# Altium schematic symbol library Thunderscope_Rev5.3.SchLib: 94 symbols
Pins are listed as number, name and electrical type; pins without a type are passive.

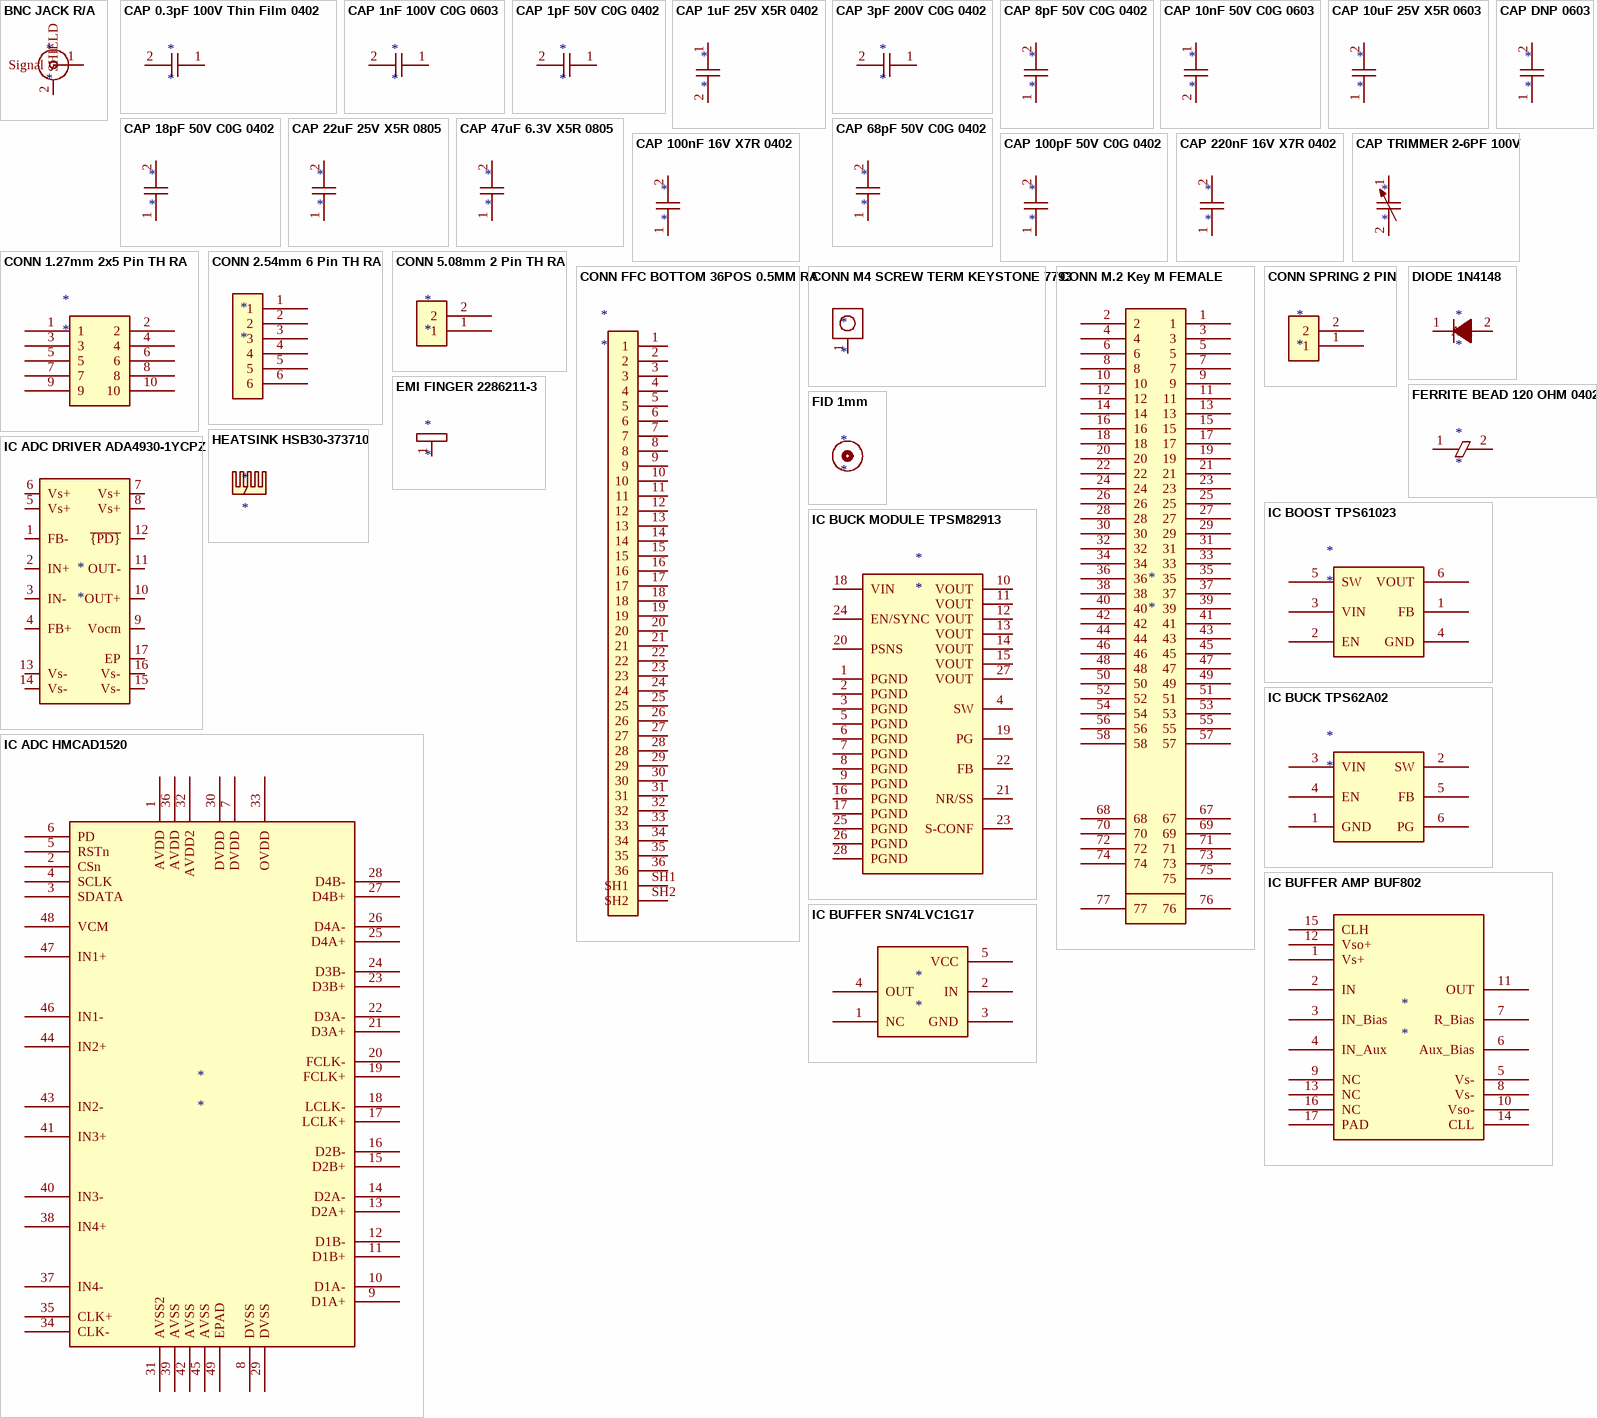
[diagram p0: symbols BNC JACK R/A to IC BUFFER SN74LVC1G17]

## BNC JACK R/A
designator *
pins: 1 Signal, 2 SHIELD

## CAP 0.3pF 100V Thin Film 0402
designator *
pins: 1, 2

## CAP 1nF 100V C0G 0603
designator *
pins: 1, 2

## CAP 1pF 50V C0G 0402
designator *
pins: 1, 2

## CAP 1uF 25V X5R 0402
designator *
pins: 1, 2

## CAP 3pF 200V C0G 0402
designator *
pins: 1, 2

## CAP 8pF 50V C0G 0402
designator *
pins: 1, 2

## CAP 10nF 50V C0G 0603
designator *
pins: 1, 2

## CAP 10uF 25V X5R 0603
designator *
pins: 1, 2

## CAP 18pF 50V C0G 0402
designator *
pins: 1, 2

## CAP 22uF 25V X5R 0805
designator *
pins: 1, 2

## CAP 47uF 6.3V X5R 0805
designator *
pins: 1, 2

## CAP 68pF 50V C0G 0402
designator *
pins: 1, 2

## CAP 100nF 16V X7R 0402
designator *
pins: 1, 2

## CAP 100pF 50V C0G 0402
designator *
pins: 1, 2

## CAP 220nF 16V X7R 0402
designator *
pins: 1, 2

## CAP DNP 0603
designator *
pins: 1, 2

## CAP TRIMMER 2-6PF 100V
designator *
pins: 1, 2

## CONN 1.27mm 2x5 Pin TH RA
designator *
pins: 1, 2, 3, 4, 5, 6, 7, 8, 9, 10

## CONN 2.54mm 6 Pin TH RA
designator *
pins: 1, 2, 3, 4, 5, 6

## CONN 5.08mm 2 Pin TH RA
designator *
pins: 1, 2

## CONN FFC BOTTOM 36POS 0.5MM RA
designator *
pins: 1, 2, 3, 4, 5, 6, 7, 8, 9, 10, 11, 12, 13, 14, 15, 16, 17, 18, 19, 20, 21, 22, 23, 24, 25, 26, 27, 28, 29, 30, 31, 32, 33, 34, 35, 36, SH1, SH2

## CONN M4 SCREW TERM KEYSTONE 7793
designator *
pins: 1

## CONN M.2 Key M FEMALE
designator *
pins: 1, 2, 3, 4, 5, 6, 7, 8, 9, 10, 11, 12, 13, 14, 15, 16, 17, 18, 19, 20, 21, 22, 23, 24, 25, 26, 27, 28, 29, 30, 31, 32, 33, 34, 35, 36, 37, 38, 39, 40, 41, 42, 43, 44, 45, 46, 47, 48, 49, 50, 51, 52, 53, 54, 55, 56, 57, 58, 67, 68, 69, 70, 71, 72, 73, 74, 75, 76, 77

## CONN SPRING 2 PIN
designator *
pins: 1, 2

## DIODE 1N4148
designator *
pins: 1 K, 2 A

## EMI FINGER 2286211-3
designator *
pins: 1

## FERRITE BEAD 120 OHM 0402
designator *
pins: 1, 2

## FID 1mm
designator *

## HEATSINK HSB30-373710
designator *

## IC ADC DRIVER ADA4930-1YCPZ
designator *
pins: 1 FB-, 2 IN+, 3 IN-, 4 FB+, 5 Vs+, 6 Vs+, 7 Vs+, 8 Vs+, 9 Vocm, 10 OUT+, 11 OUT-, 12 ~{{PD}}, 13 Vs-, 14 Vs-, 15 Vs-, 16 Vs-, 17 EP

## IC ADC HMCAD1520
designator *
pins: 1 AVDD, 2 CSn, 3 SDATA, 4 SCLK, 5 RSTn, 6 PD, 7 DVDD, 8 DVSS, 9 D1A+, 10 D1A-, 11 D1B+, 12 D1B-, 13 D2A+, 14 D2A-, 15 D2B+, 16 D2B-, 17 LCLK+, 18 LCLK-, 19 FCLK+, 20 FCLK-, 21 D3A+, 22 D3A-, 23 D3B+, 24 D3B-, 25 D4A+, 26 D4A-, 27 D4B+, 28 D4B-, 29 DVSS, 30 DVDD, 31 AVSS2, 32 AVDD2, 33 OVDD, 34 CLK-, 35 CLK+, 36 AVDD, 37 IN4-, 38 IN4+, 39 AVSS, 40 IN3-, 41 IN3+, 42 AVSS, 43 IN2-, 44 IN2+, 45 AVSS, 46 IN1-, 47 IN1+, 48 VCM, 49 EPAD

## IC BOOST TPS61023
designator *
pins: 1 FB, 2 EN, 3 VIN, 4 GND, 5 SW, 6 VOUT

## IC BUCK MODULE TPSM82913
designator *
pins: 1 PGND, 2 PGND, 3 PGND, 4 SW, 5 PGND, 6 PGND, 7 PGND, 8 PGND, 9 PGND, 10 VOUT, 11 VOUT, 12 VOUT, 13 VOUT, 14 VOUT, 15 VOUT, 16 PGND, 17 PGND, 18 VIN, 19 PG, 20 PSNS, 21 NR/SS, 22 FB, 23 S-CONF, 24 EN/SYNC, 25 PGND, 26 PGND, 27 VOUT, 28 PGND

## IC BUCK TPS62A02
designator *
pins: 1 GND, 2 SW, 3 VIN, 4 EN, 5 FB, 6 PG

## IC BUFFER AMP BUF802
designator *
pins: 1 Vs+, 2 IN, 3 IN_Bias, 4 IN_Aux, 5 Vs-, 6 Aux_Bias, 7 R_Bias, 8 Vs-, 9 NC, 10 Vso-, 11 OUT, 12 Vso+, 13 NC, 14 CLL, 15 CLH, 16 NC, 17 PAD

## IC BUFFER SN74LVC1G17
designator *
pins: 1 NC, 2 IN, 3 GND, 4 OUT, 5 VCC

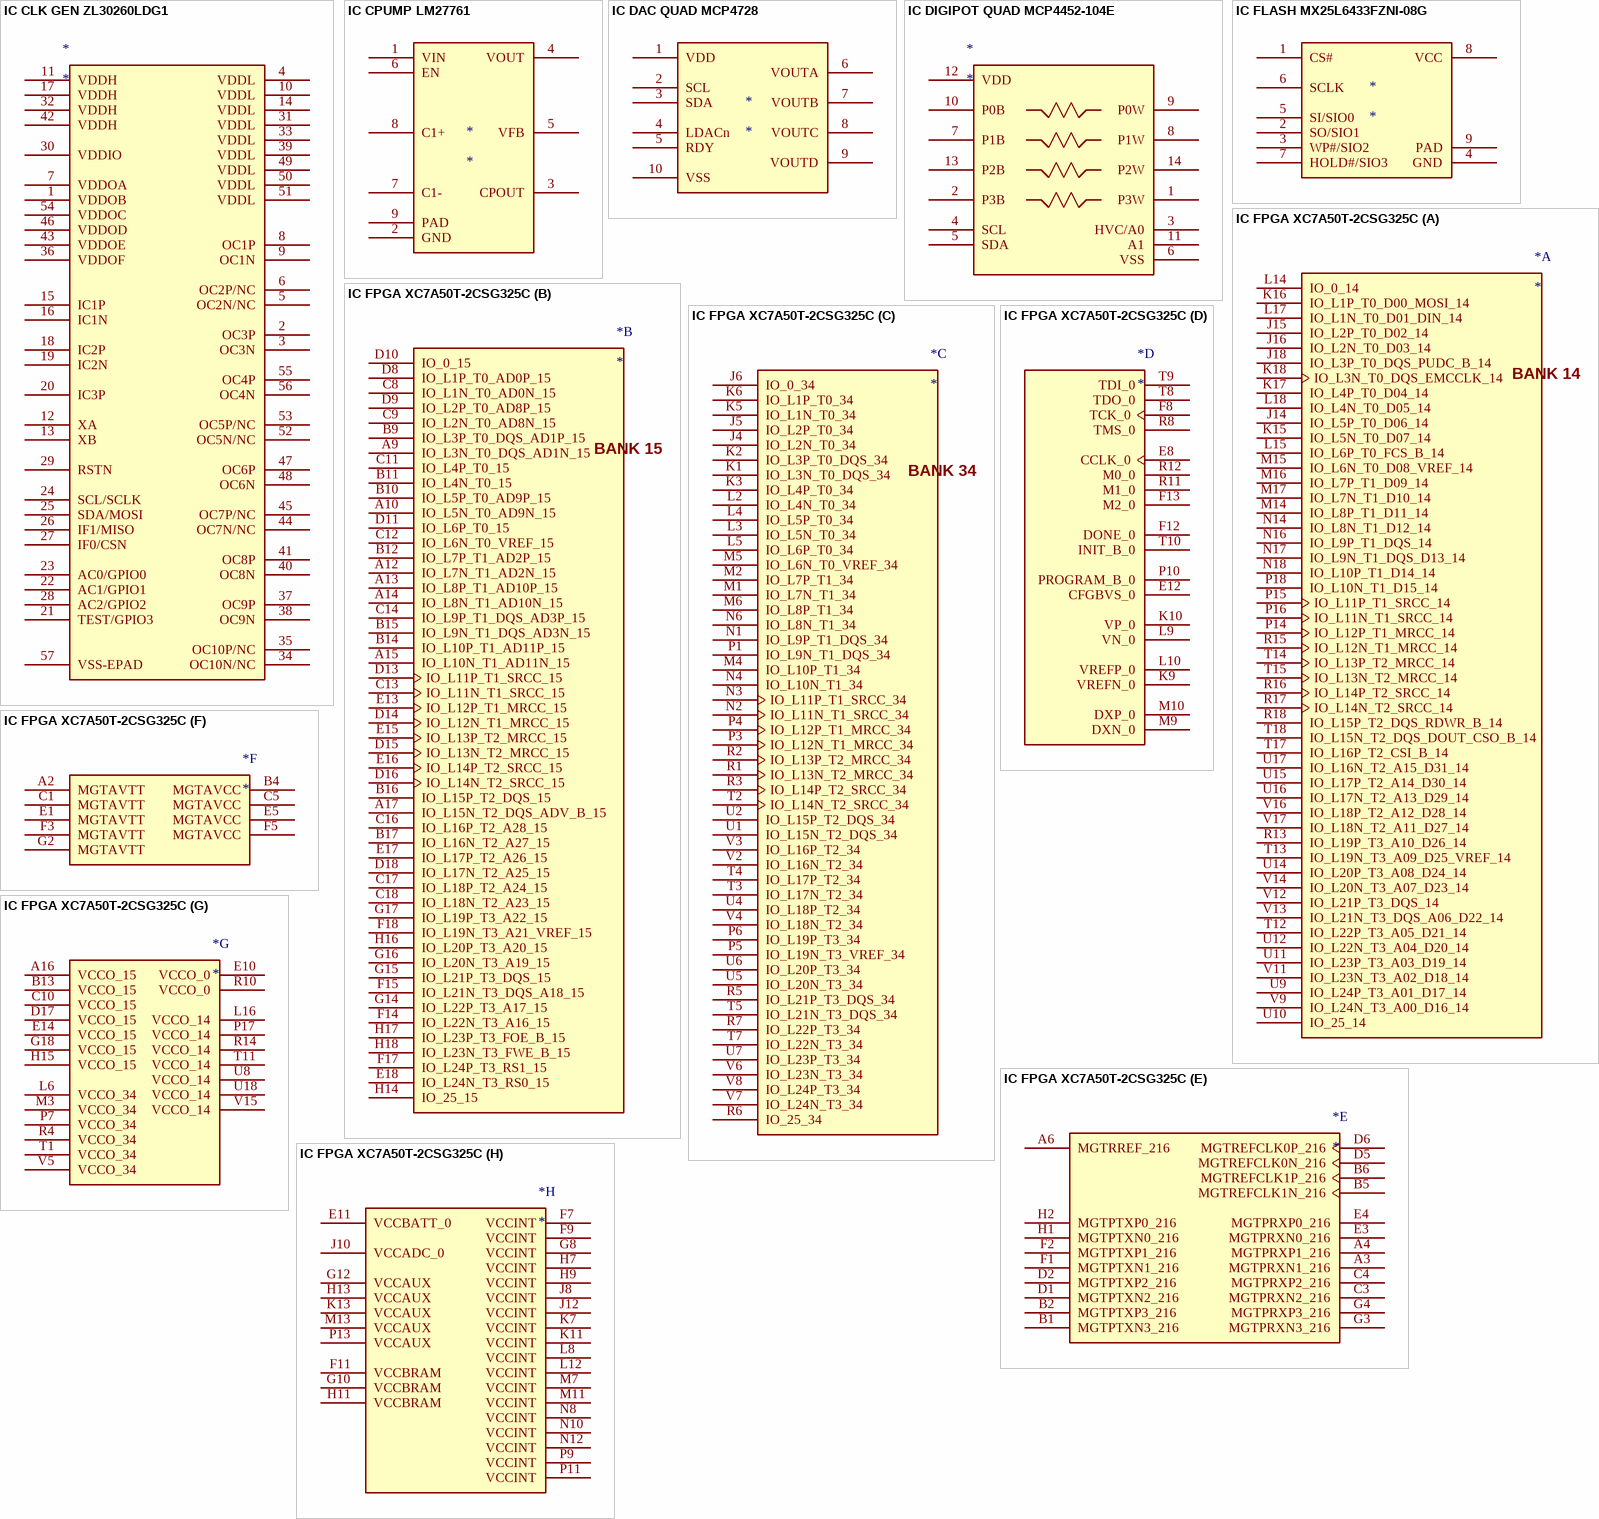
[diagram p1: symbols IC CLK GEN ZL30260LDG1 to IC FPGA XC7A50T-2CSG325C]

## IC CLK GEN ZL30260LDG1
designator *
pins: 1 VDDOB, 2 OC3P, 3 OC3N, 4 VDDL, 5 OC2N/NC, 6 OC2P/NC, 7 VDDOA, 8 OC1P, 9 OC1N, 10 VDDL, 11 VDDH, 12 XA, 13 XB, 14 VDDL, 15 IC1P, 16 IC1N, 17 VDDH, 18 IC2P, 19 IC2N, 20 IC3P, 21 TEST/GPIO3, 22 AC1/GPIO1, 23 AC0/GPIO0, 24 SCL/SCLK, 25 SDA/MOSI, 26 IF1/MISO, 27 IF0/CSN, 28 AC2/GPIO2, 29 RSTN, 30 VDDIO, 31 VDDL, 32 VDDH, 33 VDDL, 34 OC10N/NC, 35 OC10P/NC, 36 VDDOF, 37 OC9P, 38 OC9N, 39 VDDL, 40 OC8N, 41 OC8P, 42 VDDH, 43 VDDOE, 44 OC7N/NC, 45 OC7P/NC, 46 VDDOD, 47 OC6P, 48 OC6N, 49 VDDL, 50 VDDL, 51 VDDL, 52 OC5N/NC, 53 OC5P/NC, 54 VDDOC, 55 OC4P, 56 OC4N, 57 VSS-EPAD

## IC CPUMP LM27761
designator *
pins: 1 VIN, 2 GND, 3 CPOUT, 4 VOUT, 5 VFB, 6 EN, 7 C1-, 8 C1+, 9 PAD

## IC DAC QUAD MCP4728
designator *
pins: 1 VDD, 2 SCL, 3 SDA, 4 LDACn, 5 RDY, 6 VOUTA, 7 VOUTB, 8 VOUTC, 9 VOUTD, 10 VSS

## IC DIGIPOT QUAD MCP4452-104E
designator *
pins: 1 P3W, 2 P3B, 3 HVC/A0, 4 SCL, 5 SDA, 6 VSS, 7 P1B, 8 P1W, 9 P0W, 10 P0B, 11 A1, 12 VDD, 13 P2B, 14 P2W

## IC FLASH MX25L6433FZNI-08G
designator *
pins: 1 CS#, 2 SO/SIO1, 3 WP#/SIO2, 4 GND, 5 SI/SIO0, 6 SCLK, 7 HOLD#/SIO3, 8 VCC, 9 PAD

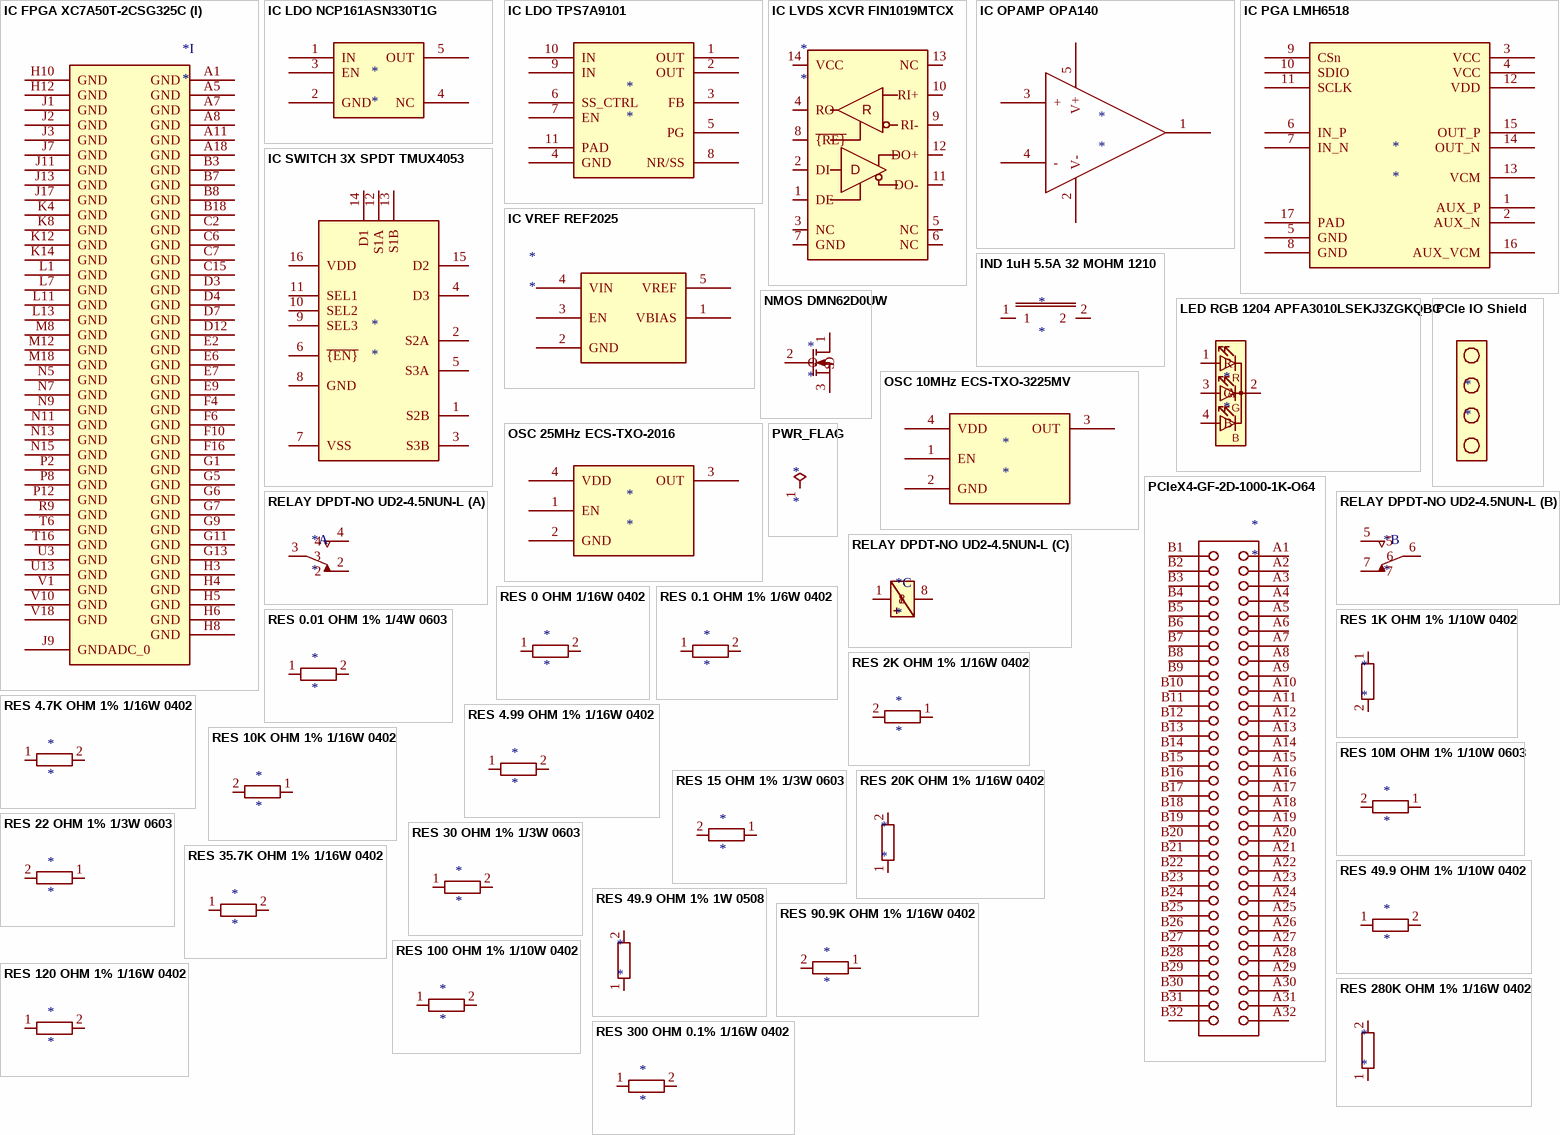
[diagram p2: symbols IC FPGA XC7A50T-2CSG325C to RES 300 OHM 0.1% 1/16W 0402]

## IC FPGA XC7A50T-2CSG325C
designator *
part A pins: J14 IO_L5P_T0_D06_14, J15 IO_L2P_T0_D02_14, J16 IO_L2N_T0_D03_14, J18 IO_L3P_T0_DQS_PUDC_B_14, K15 IO_L5N_T0_D07_14, K16 IO_L1P_T0_D00_MOSI_14, K17 IO_L4P_T0_D04_14, K18 IO_L3N_T0_DQS_EMCCLK_14, L14 IO_0_14, L15 IO_L6P_T0_FCS_B_14, L17 IO_L1N_T0_D01_DIN_14, L18 IO_L4N_T0_D05_14, M14 IO_L8P_T1_D11_14, M15 IO_L6N_T0_D08_VREF_14, M16 IO_L7P_T1_D09_14, M17 IO_L7N_T1_D10_14, N14 IO_L8N_T1_D12_14, N16 IO_L9P_T1_DQS_14, N17 IO_L9N_T1_DQS_D13_14, N18 IO_L10P_T1_D14_14, P14 IO_L12P_T1_MRCC_14, P15 IO_L11P_T1_SRCC_14, P16 IO_L11N_T1_SRCC_14, P18 IO_L10N_T1_D15_14, R13 IO_L19P_T3_A10_D26_14, R15 IO_L12N_T1_MRCC_14, R16 IO_L14P_T2_SRCC_14, R17 IO_L14N_T2_SRCC_14, R18 IO_L15P_T2_DQS_RDWR_B_14, T12 IO_L22P_T3_A05_D21_14, T13 IO_L19N_T3_A09_D25_VREF_14, T14 IO_L13P_T2_MRCC_14, T15 IO_L13N_T2_MRCC_14, T17 IO_L16P_T2_CSI_B_14, T18 IO_L15N_T2_DQS_DOUT_CSO_B_14, U9 IO_L24P_T3_A01_D17_14, U10 IO_25_14, U11 IO_L23P_T3_A03_D19_14, U12 IO_L22N_T3_A04_D20_14, U14 IO_L20P_T3_A08_D24_14, U15 IO_L17P_T2_A14_D30_14, U16 IO_L17N_T2_A13_D29_14, U17 IO_L16N_T2_A15_D31_14, V9 IO_L24N_T3_A00_D16_14, V11 IO_L23N_T3_A02_D18_14, V12 IO_L21P_T3_DQS_14, V13 IO_L21N_T3_DQS_A06_D22_14, V14 IO_L20N_T3_A07_D23_14, V16 IO_L18P_T2_A12_D28_14, V17 IO_L18N_T2_A11_D27_14
part B pins: A9 IO_L3N_T0_DQS_AD1N_15, A10 IO_L5N_T0_AD9N_15, A12 IO_L7N_T1_AD2N_15, A13 IO_L8P_T1_AD10P_15, A14 IO_L8N_T1_AD10N_15, A15 IO_L10N_T1_AD11N_15, A17 IO_L15N_T2_DQS_ADV_B_15, B9 IO_L3P_T0_DQS_AD1P_15, B10 IO_L5P_T0_AD9P_15, B11 IO_L4N_T0_15, B12 IO_L7P_T1_AD2P_15, B14 IO_L10P_T1_AD11P_15, B15 IO_L9N_T1_DQS_AD3N_15, B16 IO_L15P_T2_DQS_15, B17 IO_L16N_T2_A27_15, C8 IO_L1N_T0_AD0N_15, C9 IO_L2N_T0_AD8N_15, C11 IO_L4P_T0_15, C12 IO_L6N_T0_VREF_15, C13 IO_L11N_T1_SRCC_15, C14 IO_L9P_T1_DQS_AD3P_15, C16 IO_L16P_T2_A28_15, C17 IO_L18P_T2_A24_15, C18 IO_L18N_T2_A23_15, D8 IO_L1P_T0_AD0P_15, D9 IO_L2P_T0_AD8P_15, D10 IO_0_15, D11 IO_L6P_T0_15, D13 IO_L11P_T1_SRCC_15, D14 IO_L12N_T1_MRCC_15, D15 IO_L13N_T2_MRCC_15, D16 IO_L14N_T2_SRCC_15, D18 IO_L17N_T2_A25_15, E13 IO_L12P_T1_MRCC_15, E15 IO_L13P_T2_MRCC_15, E16 IO_L14P_T2_SRCC_15, E17 IO_L17P_T2_A26_15, E18 IO_L24N_T3_RS0_15, F14 IO_L22N_T3_A16_15, F15 IO_L21N_T3_DQS_A18_15, F17 IO_L24P_T3_RS1_15, F18 IO_L19N_T3_A21_VREF_15, G14 IO_L22P_T3_A17_15, G15 IO_L21P_T3_DQS_15, G16 IO_L20N_T3_A19_15, G17 IO_L19P_T3_A22_15, H14 IO_25_15, H16 IO_L20P_T3_A20_15, H17 IO_L23P_T3_FOE_B_15, H18 IO_L23N_T3_FWE_B_15
part C pins: J4 IO_L2N_T0_34, J5 IO_L2P_T0_34, J6 IO_0_34, K1 IO_L3N_T0_DQS_34, K2 IO_L3P_T0_DQS_34, K3 IO_L4P_T0_34, K5 IO_L1N_T0_34, K6 IO_L1P_T0_34, L2 IO_L4N_T0_34, L3 IO_L5N_T0_34, L4 IO_L5P_T0_34, L5 IO_L6P_T0_34, M1 IO_L7N_T1_34, M2 IO_L7P_T1_34, M4 IO_L10P_T1_34, M5 IO_L6N_T0_VREF_34, M6 IO_L8P_T1_34, N1 IO_L9P_T1_DQS_34, N2 IO_L11N_T1_SRCC_34, N3 IO_L11P_T1_SRCC_34, N4 IO_L10N_T1_34, N6 IO_L8N_T1_34, P1 IO_L9N_T1_DQS_34, P3 IO_L12N_T1_MRCC_34, P4 IO_L12P_T1_MRCC_34, P5 IO_L19N_T3_VREF_34, P6 IO_L19P_T3_34, R1 IO_L13N_T2_MRCC_34, R2 IO_L13P_T2_MRCC_34, R3 IO_L14P_T2_SRCC_34, R5 IO_L21P_T3_DQS_34, R6 IO_25_34, R7 IO_L22P_T3_34, T2 IO_L14N_T2_SRCC_34, T3 IO_L17N_T2_34, T4 IO_L17P_T2_34, T5 IO_L21N_T3_DQS_34, T7 IO_L22N_T3_34, U1 IO_L15N_T2_DQS_34, U2 IO_L15P_T2_DQS_34, U4 IO_L18P_T2_34, U5 IO_L20N_T3_34, U6 IO_L20P_T3_34, U7 IO_L23P_T3_34, V2 IO_L16N_T2_34, V3 IO_L16P_T2_34, V4 IO_L18N_T2_34, V6 IO_L23N_T3_34, V7 IO_L24N_T3_34, V8 IO_L24P_T3_34
part D pins: E8 CCLK_0, E12 CFGBVS_0, F8 TCK_0, F12 DONE_0, F13 M2_0, K9 VREFN_0, K10 VP_0, L9 VN_0, L10 VREFP_0, M9 DXN_0, M10 DXP_0, P10 PROGRAM_B_0, R8 TMS_0, R11 M1_0, R12 M0_0, T8 TDO_0, T9 TDI_0, T10 INIT_B_0
part E pins: A3 MGTPRXN1_216, A4 MGTPRXP1_216, A6 MGTRREF_216, B1 MGTPTXN3_216, B2 MGTPTXP3_216, B5 MGTREFCLK1N_216, B6 MGTREFCLK1P_216, C3 MGTPRXN2_216, C4 MGTPRXP2_216, D1 MGTPTXN2_216, D2 MGTPTXP2_216, D5 MGTREFCLK0N_216, D6 MGTREFCLK0P_216, E3 MGTPRXN0_216, E4 MGTPRXP0_216, F1 MGTPTXN1_216, F2 MGTPTXP1_216, G3 MGTPRXN3_216, G4 MGTPRXP3_216, H1 MGTPTXN0_216, H2 MGTPTXP0_216
part F pins: A2 MGTAVTT, B4 MGTAVCC, C1 MGTAVTT, C5 MGTAVCC, E1 MGTAVTT, E5 MGTAVCC, F3 MGTAVTT, F5 MGTAVCC, G2 MGTAVTT
part G pins: A16 VCCO_15, B13 VCCO_15, C10 VCCO_15, D17 VCCO_15, E10 VCCO_0, E14 VCCO_15, G18 VCCO_15, H15 VCCO_15, L6 VCCO_34, L16 VCCO_14, M3 VCCO_34, P7 VCCO_34, P17 VCCO_14, R4 VCCO_34, R10 VCCO_0, R14 VCCO_14, T1 VCCO_34, T11 VCCO_14, U8 VCCO_14, U18 VCCO_14, V5 VCCO_34, V15 VCCO_14
part H pins: E11 VCCBATT_0, F7 VCCINT, F9 VCCINT, F11 VCCBRAM, G8 VCCINT, G10 VCCBRAM, G12 VCCAUX, H7 VCCINT, H9 VCCINT, H11 VCCBRAM, H13 VCCAUX, J8 VCCINT, J10 VCCADC_0, J12 VCCINT, K7 VCCINT, K11 VCCINT, K13 VCCAUX, L8 VCCINT, L12 VCCINT, M7 VCCINT, M11 VCCINT, M13 VCCAUX, N8 VCCINT, N10 VCCINT, N12 VCCINT, P9 VCCINT, P11 VCCINT, P13 VCCAUX
part I pins: A1 GND, A5 GND, A7 GND, A8 GND, A11 GND, A18 GND, B3 GND, B7 GND, B8 GND, B18 GND, C2 GND, C6 GND, C7 GND, C15 GND, D3 GND, D4 GND, D7 GND, D12 GND, E2 GND, E6 GND, E7 GND, E9 GND, F4 GND, F6 GND, F10 GND, F16 GND, G1 GND, G5 GND, G6 GND, G7 GND, G9 GND, G11 GND, G13 GND, H3 GND, H4 GND, H5 GND, H6 GND, H8 GND, H10 GND, H12 GND, J1 GND, J2 GND, J3 GND, J7 GND, J9 GNDADC_0, J11 GND, J13 GND, J17 GND, K4 GND, K8 GND, K12 GND, K14 GND, L1 GND, L7 GND, L11 GND, L13 GND, M8 GND, M12 GND, M18 GND, N5 GND, N7 GND, N9 GND, N11 GND, N13 GND, N15 GND, P2 GND, P8 GND, P12 GND, R9 GND, T6 GND, T16 GND, U3 GND, U13 GND, V1 GND, V10 GND, V18 GND
part A text: BANK 14
part B text: BANK 15
part C text: BANK 34

## IC LDO NCP161ASN330T1G
designator *
pins: 1 IN, 2 GND, 3 EN, 4 NC, 5 OUT

## IC LDO TPS7A9101
designator *
pins: 1 OUT, 2 OUT, 3 FB, 4 GND, 5 PG, 6 SS_CTRL, 7 EN, 8 NR/SS, 9 IN, 10 IN, 11 PAD

## IC LVDS XCVR FIN1019MTCX
designator *
pins: 1 DE, 2 DI, 3 NC, 4 RO, 5 NC, 6 NC, 7 GND, 8 ~{{RE}}, 9 RI-, 10 RI+, 11 DO-, 12 DO+, 13 NC, 14 VCC
text: R; D

## IC OPAMP OPA140
designator *
pins: 1 OUT, 2 V-, 3 +, 4 -, 5 V+

## IC PGA LMH6518
designator *
pins: 1 AUX_P, 2 AUX_N, 3 VCC, 4 VCC, 5 GND, 6 IN_P, 7 IN_N, 8 GND, 9 CSn, 10 SDIO, 11 SCLK, 12 VDD, 13 VCM, 14 OUT_N, 15 OUT_P, 16 AUX_VCM, 17 PAD

## IC SWITCH 3X SPDT TMUX4053
designator *
pins: 1 S2B, 2 S2A, 3 S3B, 4 D3, 5 S3A, 6 ~{{EN}}, 7 VSS, 8 GND, 9 SEL3, 10 SEL2, 11 SEL1, 12 S1A, 13 S1B, 14 D1, 15 D2, 16 VDD

## IC VREF REF2025
designator *
pins: 1 VBIAS, 2 GND, 3 EN, 4 VIN, 5 VREF

## IND 1uH 5.5A 32 MOHM 1210
designator *
pins: 1, 2

## LED RGB 1204 APFA3010LSEKJ3ZGKQBC
designator *
pins: 1 R, 2 A, 3 G, 4 B

## NMOS DMN62D0UW
designator *
pins: 1 D, 2 G, 3 S

## OSC 10MHz ECS-TXO-3225MV
designator *
pins: 1 EN, 2 GND, 3 OUT, 4 VDD

## OSC 25MHz ECS-TXO-2016
designator *
pins: 1 EN, 2 GND, 3 OUT, 4 VDD

## PCIe IO Shield
designator *

## PCIeX4-GF-2D-1000-1K-O64
designator *
pins: A1, A2, A3, A4, A5, A6, A7, A8, A9, A10, A11, A12, A13, A14, A15, A16, A17, A18, A19, A20, A21, A22, A23, A24, A25, A26, A27, A28, A29, A30, A31, A32, B1, B2, B3, B4, B5, B6, B7, B8, B9, B10, B11, B12, B13, B14, B15, B16, B17, B18, B19, B20, B21, B22, B23, B24, B25, B26, B27, B28, B29, B30, B31, B32

## PWR_FLAG
designator *  (graphical)
pins: 1

## RELAY DPDT-NO UD2-4.5NUN-L
designator *
part A pins: 2, 3, 4
part B pins: 5, 6, 7
part C pins: 1, 8

## RES 0 OHM 1/16W 0402
designator *
pins: 1, 2

## RES 0.01 OHM 1% 1/4W 0603
designator *
pins: 1, 2

## RES 0.1 OHM 1% 1/6W 0402
designator *
pins: 1, 2

## RES 1K OHM 1% 1/10W 0402
designator *
pins: 1, 2

## RES 2K OHM 1% 1/16W 0402
designator *
pins: 1, 2

## RES 4.7K OHM 1% 1/16W 0402
designator *
pins: 1, 2

## RES 4.99 OHM 1% 1/16W 0402
designator *
pins: 1, 2

## RES 10K OHM 1% 1/16W 0402
designator *
pins: 1, 2

## RES 10M OHM 1% 1/10W 0603
designator *
pins: 1, 2

## RES 15 OHM 1% 1/3W 0603
designator *
pins: 1, 2

## RES 20K OHM 1% 1/16W 0402
designator *
pins: 1, 2

## RES 22 OHM 1% 1/3W 0603
designator *
pins: 1, 2

## RES 30 OHM 1% 1/3W 0603
designator *
pins: 1, 2

## RES 35.7K OHM 1% 1/16W 0402
designator *
pins: 1, 2

## RES 49.9 OHM 1% 1/10W 0402
designator *
pins: 1, 2

## RES 49.9 OHM 1% 1W 0508
designator *
pins: 1, 2

## RES 90.9K OHM 1% 1/16W 0402
designator *
pins: 1, 2

## RES 100 OHM 1% 1/10W 0402
designator *
pins: 1, 2

## RES 120 OHM 1% 1/16W 0402
designator *
pins: 1, 2

## RES 280K OHM 1% 1/16W 0402
designator *
pins: 1, 2

## RES 300 OHM 0.1% 1/16W 0402
designator *
pins: 1, 2

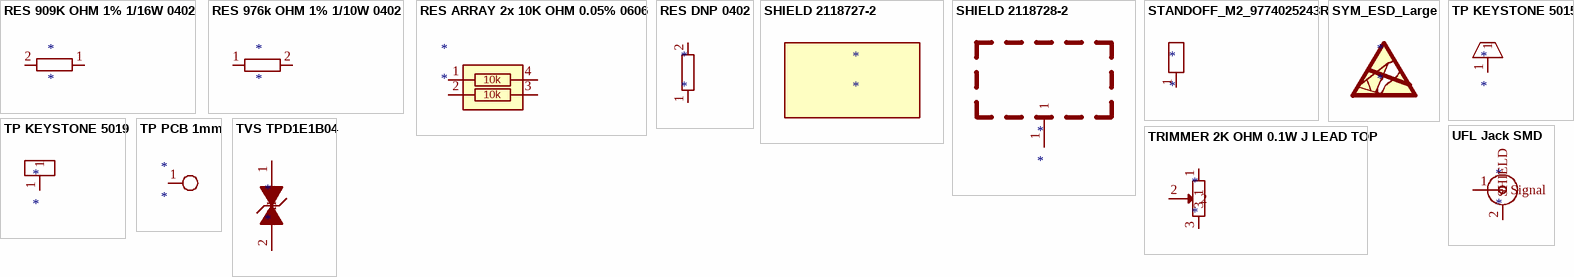
[diagram p3: symbols RES 909K OHM 1% 1/16W 0402 to UFL Jack SMD]

## RES 909K OHM 1% 1/16W 0402
designator *
pins: 1, 2

## RES 976k OHM 1% 1/10W 0402
designator *
pins: 1, 2

## RES ARRAY 2x 10K OHM 0.05% 0606
designator *
pins: 1, 2, 3, 4
text: 10k

## RES DNP 0402
designator *
pins: 1, 2

## SHIELD 2118727-2
designator *

## SHIELD 2118728-2
designator *
pins: 1

## STANDOFF_M2_9774025243R
designator *
pins: 1

## SYM_ESD_Large
designator *

## TP KEYSTONE 5015
designator *
pins: 1

## TP KEYSTONE 5019
designator *
pins: 1

## TP PCB 1mm
designator *
pins: 1

## TRIMMER 2K OHM 0.1W J LEAD TOP
designator *
pins: 1, 2, 3

## TVS TPD1E1B04
designator *
pins: 1 K, 2 A

## UFL Jack SMD
designator *
pins: 1 Signal, 2 SHIELD